# EAGLE library part KTD2026EWE-TR (library KTD2026EWE-TR)
LED Lighting Drivers 3-Channel RGB Driver, I2C, 1.5x1.5mm TDFN Source: Datasheet <https://componentsearchengine.com/Datasheets/1/KTD2026EWE-TR.pdf>
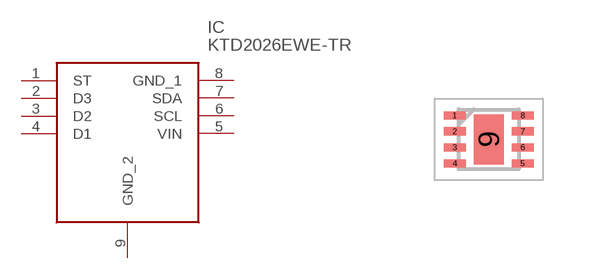
[diagram p0: symbol with the pads of SON40P150X150X55-9N; footprint SON40P150X150X55-9N]

Designator prefix IC

## KTD2026EWE-TR (Description: LED Lighting Drivers 3-Channel RGB Driver, I2C, 1.5x1.5mm TDFN; Height: 0.55mm; Manufacturer_Name: Kinetic Technologies; Manufacturer_Part_Number: KTD2026EWE-TR; Mouser_Part_Number: 389-KTD2026EWETR; Mouser_Price-Stock: https://www.mouser.co.uk/ProductDetail/Kinetic-Technologies/KTD2026EWE-TR?qs=lc2O%252BfHJPVZPUWgdBYxlOA%3D%3D)  [SON40P150X150X55-9N]
1  ST
2  D3
3  D2
4  D1
5  VIN  pwr
6  SCL
7  SDA
8  GND_1  pwr
9  GND_2  pwr

## Footprint SON40P150X150X55-9N (pad centres in mm)
PSON40P150x150x55-9N
smd 0.55 x 0.2: 1 -0.85,0.6; 2 -0.85,0.2; 3 -0.85,-0.2; 4 -0.85,-0.6; 5 0.85,-0.6; 6 0.85,-0.2; 7 0.85,0.2; 8 0.85,0.6
smd 0.75 x 1.25: 9 0,0